# Altium footprint library Switch-TactileButton.PcbLib: 78 footprints (part 3 of 5)
Each footprint in its own frame and in the unit in brackets; x right, y up, seen from the top. Pads: shape width x height; smd on the part's side, far side on the other; paste and mask are expansions set on the pad; w line width, h text height; cw(c..) or ccw(c..) is an arc to the next point about the centre after c.
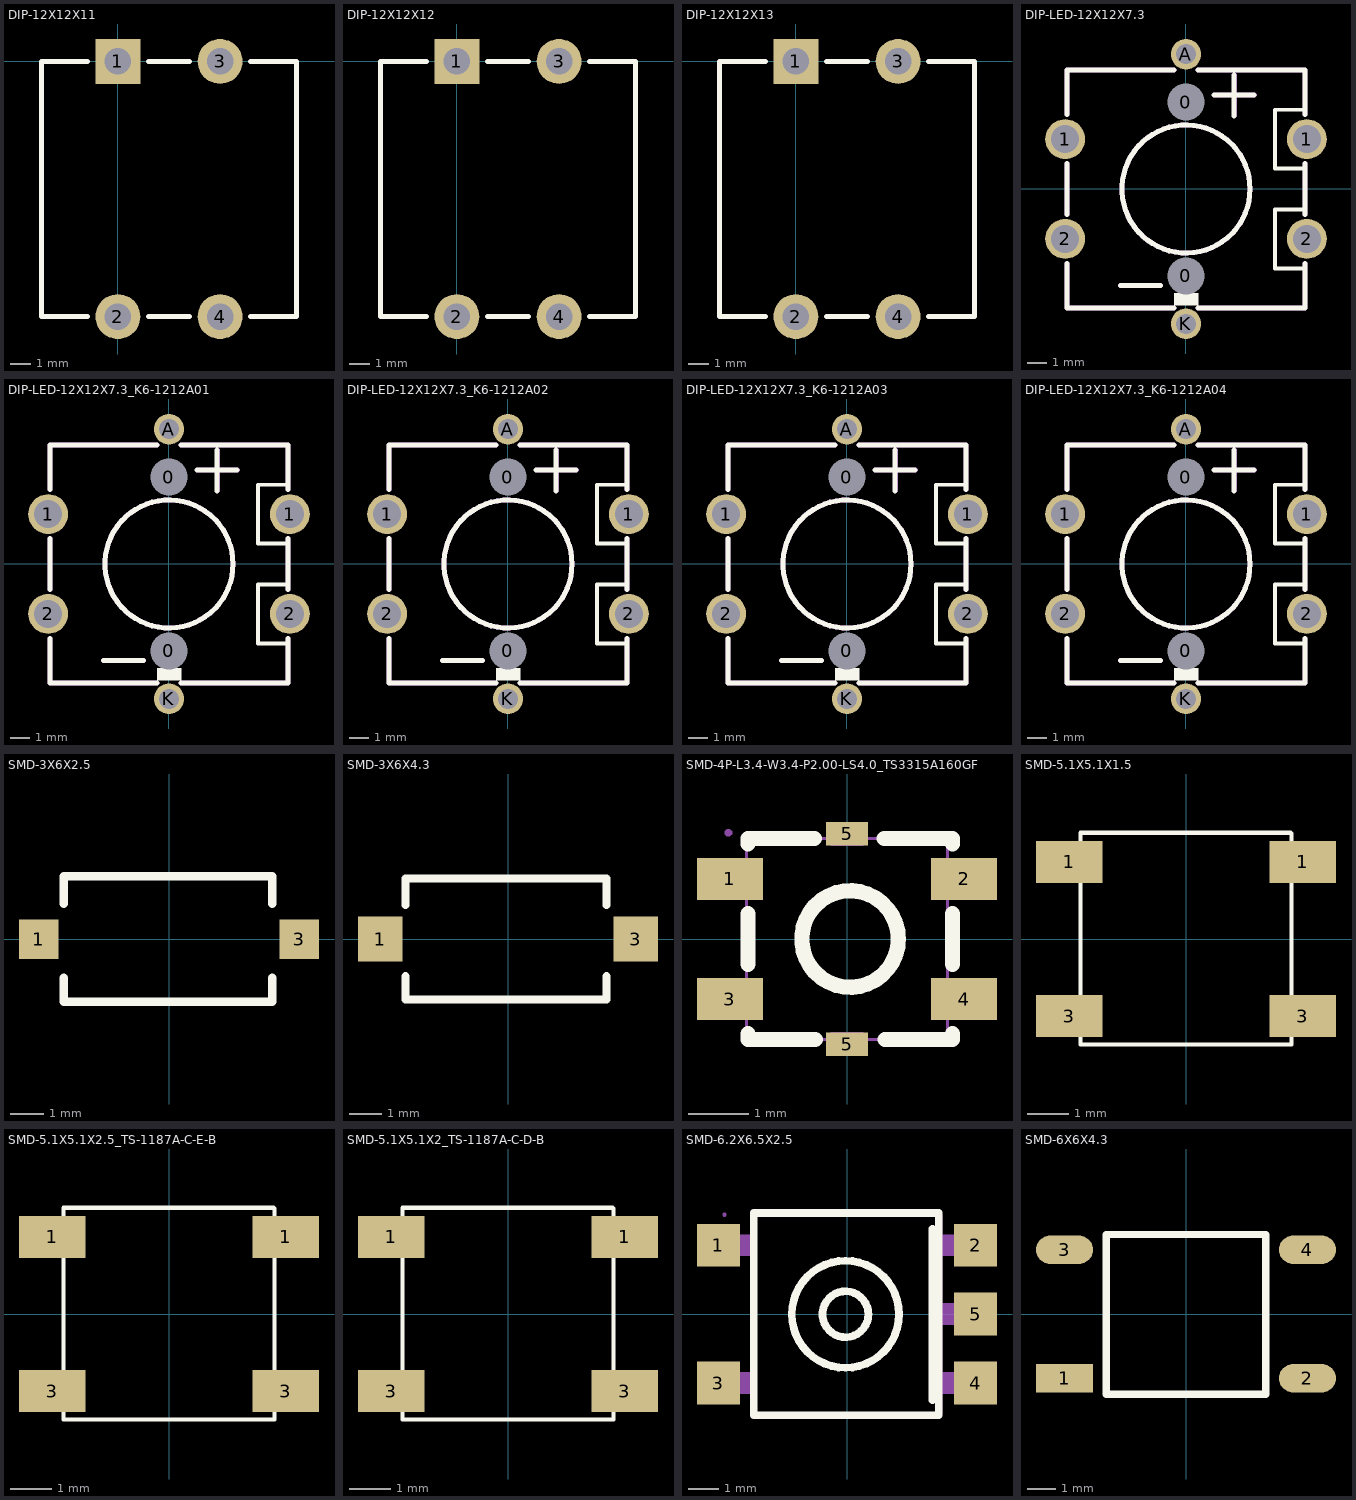
[diagram p2: the footprints below, top view; thin cyan lines are the x and y axes]

## DIP-12X12X11 [mm]
pads (4):
  rect 2.2x2.2 hole 1.3: 1(0,0)
  round 2.2 hole 1.3: 2(0,-12.5) 3(5,0) 4(5,-12.5)
Top Overlay:
  lines w0.254: -1.5,-12.5 -3.75,-12.5 -3.75,0 -1.5,0 ; 1.5,-12.5 3.5,-12.5 ; 1.5,0 3.5,0 ; 6.5,-12.5 8.75,-12.5 8.75,0 6.5,0
3D body "DIP-12X12X11.STEP": height 11.15, standoff -3.35, extent -3.46,-13.208 8.54,0.589

## DIP-12X12X12 [mm]
pads (4):
  rect 2.2x2.2 hole 1.3: 1(0,0)
  round 2.2 hole 1.3: 2(0,-12.5) 3(5,0) 4(5,-12.5)
Top Overlay:
  lines w0.254: -1.5,-12.5 -3.75,-12.5 -3.75,0 -1.5,0 ; 1.5,-12.5 3.5,-12.5 ; 1.5,0 3.5,0 ; 6.5,-12.5 8.75,-12.5 8.75,0 6.5,0
3D body "DIP-12X12X12.STEP": height 12.15, standoff -3.35, extent -3.46,-13.081 8.54,0.716

## DIP-12X12X13 [mm]
pads (4):
  rect 2.2x2.2 hole 1.3: 1(0,0)
  round 2.2 hole 1.3: 2(0,-12.5) 3(5,0) 4(5,-12.5)
Top Overlay:
  lines w0.254: -1.5,-12.5 -3.75,-12.5 -3.75,0 -1.5,0 ; 1.5,-12.5 3.5,-12.5 ; 1.5,0 3.5,0 ; 6.5,-12.5 8.75,-12.5 8.75,0 6.5,0
3D body "DIP-12X12X13.STEP": height 13.31, standoff -3.19, extent -3.46,-13.208 8.54,0.589

## DIP-LED-12X12X7.3 [mm] "韩国韩荣  K6-1212A01"
pads (8):
  round 1.524 hole 1.85 unplated: 0(0,-4.35) 0(0,4.35)
  round 2 hole 1.4: 1(-6.05,2.5) 1(6.05,2.5) 2(-6.05,-2.5) 2(6.05,-2.5)
  round 1.524 hole 1: A(0,6.75) K(0,-6.75)
Top Overlay:
  circle w0.254: c0,0 r3.205
  rectangle: -0.612,-5.842 0.635,-5.207
  lines w0.2: 5.969,-3.984 4.445,-3.984 4.445,-1.031 5.969,-1.031 ; 5.969,1.016 4.445,1.016 4.445,3.969 5.969,3.969
  lines w0.254: -5.969,-3.728 -5.969,-5.969 -0.612,-5.969 ; -5.969,-1.272 -5.969,1.272 ; -5.969,3.728 -5.969,5.969 -0.612,5.969 ; -3.286,-4.826 -1.286,-4.826 ; 0.612,-5.969 5.969,-5.969 5.969,-3.728 ; 0.612,5.969 5.969,5.969 5.969,3.728 ; 1.413,4.699 3.413,4.699 ; 2.413,3.668 2.413,5.699 ; 5.969,-1.272 5.969,1.272
Top Value:
  text "'.Comment'" at -4.346,-0.578 h2
Top Designator:
  text "'.Designator'" at -5.626,-0.416 h2
Top Assembly (Mech20):
  circle w0.254: c0,0 r3.205
  lines w0.254: -5.969,-3.728 -5.969,-5.969 -0.612,-5.969 ; -5.969,-1.271 -5.969,1.272 ; -5.969,3.729 -5.969,5.969 -0.612,5.969 ; -3.286,-4.826 -1.286,-4.826 ; 0.612,-5.969 5.969,-5.969 5.969,-3.728 ; 0.612,5.969 5.969,5.969 5.969,3.729 ; 1.424,4.714 3.424,4.714 ; 2.424,3.683 2.424,5.714 ; 5.969,-1.271 5.969,1.272
3D body "K6-1212A01.step": height 7.35, standoff -3.25, extent -6.74,-7 6.74,7

## DIP-LED-12X12X7.3_K6-1212A01 [mm] "韩国韩荣  K6-1212A01"
pads (8):
  round 1.524 hole 1.85 unplated: 0(0,-4.35) 0(0,4.35)
  round 2 hole 1.4: 1(-6.05,2.5) 1(6.05,2.5) 2(-6.05,-2.5) 2(6.05,-2.5)
  round 1.524 hole 1: A(0,6.75) K(0,-6.75)
Top Overlay:
  circle w0.254: c0,0 r3.205
  rectangle: -0.612,-5.842 0.635,-5.207
  lines w0.2: 5.969,-3.984 4.445,-3.984 4.445,-1.031 5.969,-1.031 ; 5.969,1.016 4.445,1.016 4.445,3.969 5.969,3.969
  lines w0.254: -5.969,-3.728 -5.969,-5.969 -0.612,-5.969 ; -5.969,-1.272 -5.969,1.272 ; -5.969,3.728 -5.969,5.969 -0.612,5.969 ; -3.286,-4.826 -1.286,-4.826 ; 0.612,-5.969 5.969,-5.969 5.969,-3.728 ; 0.612,5.969 5.969,5.969 5.969,3.728 ; 1.413,4.699 3.413,4.699 ; 2.413,3.668 2.413,5.699 ; 5.969,-1.272 5.969,1.272
Top Value:
  text "'.Comment'" at -4.346,-0.578 h2
Top Designator:
  text "'.Designator'" at -5.626,-0.416 h2
Top Assembly (Mech20):
  circle w0.254: c0,0 r3.205
  lines w0.254: -5.969,-3.728 -5.969,-5.969 -0.612,-5.969 ; -5.969,-1.271 -5.969,1.272 ; -5.969,3.729 -5.969,5.969 -0.612,5.969 ; -3.286,-4.826 -1.286,-4.826 ; 0.612,-5.969 5.969,-5.969 5.969,-3.728 ; 0.612,5.969 5.969,5.969 5.969,3.729 ; 1.424,4.714 3.424,4.714 ; 2.424,3.683 2.424,5.714 ; 5.969,-1.271 5.969,1.272
3D body "K6-1212A01.step": height 7.35, standoff -3.25, extent -6.74,-7 6.74,7

## DIP-LED-12X12X7.3_K6-1212A02 [mm] "韩国韩荣  K6-1212A02"
pads (8):
  round 1.524 hole 1.85 unplated: 0(0,-4.35) 0(0,4.35)
  round 2 hole 1.4: 1(-6.05,2.5) 1(6.05,2.5) 2(-6.05,-2.5) 2(6.05,-2.5)
  round 1.524 hole 1: A(0,6.75) K(0,-6.75)
Top Overlay:
  circle w0.254: c0,0 r3.205
  rectangle: -0.612,-5.842 0.635,-5.207
  lines w0.2: 5.969,-3.984 4.445,-3.984 4.445,-1.031 5.969,-1.031 ; 5.969,1.016 4.445,1.016 4.445,3.969 5.969,3.969
  lines w0.254: -5.969,-3.728 -5.969,-5.969 -0.612,-5.969 ; -5.969,-1.272 -5.969,1.272 ; -5.969,3.728 -5.969,5.969 -0.612,5.969 ; -3.286,-4.826 -1.286,-4.826 ; 0.612,-5.969 5.969,-5.969 5.969,-3.728 ; 0.612,5.969 5.969,5.969 5.969,3.728 ; 1.413,4.699 3.413,4.699 ; 2.413,3.668 2.413,5.699 ; 5.969,-1.272 5.969,1.272
Top Value:
  text "'.Comment'" at -4.346,-0.578 h2
Top Designator:
  text "'.Designator'" at -5.626,-0.416 h2
Top Assembly (Mech20):
  circle w0.254: c0,0 r3.205
  lines w0.254: -5.969,-3.728 -5.969,-5.969 -0.612,-5.969 ; -5.969,-1.271 -5.969,1.272 ; -5.969,3.729 -5.969,5.969 -0.612,5.969 ; -3.286,-4.826 -1.286,-4.826 ; 0.612,-5.969 5.969,-5.969 5.969,-3.728 ; 0.612,5.969 5.969,5.969 5.969,3.729 ; 1.424,4.714 3.424,4.714 ; 2.424,3.683 2.424,5.714 ; 5.969,-1.271 5.969,1.272
3D body "K6-1212A02.step": height 7.35, standoff -3.25, extent -6.74,-7 6.74,7

## DIP-LED-12X12X7.3_K6-1212A03 [mm] "韩国韩荣  K6-1212A03"
pads (8):
  round 1.524 hole 1.85 unplated: 0(0,-4.35) 0(0,4.35)
  round 2 hole 1.4: 1(-6.05,2.5) 1(6.05,2.5) 2(-6.05,-2.5) 2(6.05,-2.5)
  round 1.524 hole 1: A(0,6.75) K(0,-6.75)
Top Overlay:
  circle w0.254: c0,0 r3.205
  rectangle: -0.612,-5.842 0.635,-5.207
  lines w0.2: 5.969,-3.984 4.445,-3.984 4.445,-1.031 5.969,-1.031 ; 5.969,1.016 4.445,1.016 4.445,3.969 5.969,3.969
  lines w0.254: -5.969,-3.728 -5.969,-5.969 -0.612,-5.969 ; -5.969,-1.272 -5.969,1.272 ; -5.969,3.728 -5.969,5.969 -0.612,5.969 ; -3.286,-4.826 -1.286,-4.826 ; 0.612,-5.969 5.969,-5.969 5.969,-3.728 ; 0.612,5.969 5.969,5.969 5.969,3.728 ; 1.413,4.699 3.413,4.699 ; 2.413,3.668 2.413,5.699 ; 5.969,-1.272 5.969,1.272
Top Value:
  text "'.Comment'" at -4.346,-0.578 h2
Top Designator:
  text "'.Designator'" at -5.626,-0.416 h2
Top Assembly (Mech20):
  circle w0.254: c0,0 r3.205
  lines w0.254: -5.969,-3.728 -5.969,-5.969 -0.612,-5.969 ; -5.969,-1.271 -5.969,1.272 ; -5.969,3.729 -5.969,5.969 -0.612,5.969 ; -3.286,-4.826 -1.286,-4.826 ; 0.612,-5.969 5.969,-5.969 5.969,-3.728 ; 0.612,5.969 5.969,5.969 5.969,3.729 ; 1.424,4.714 3.424,4.714 ; 2.424,3.683 2.424,5.714 ; 5.969,-1.271 5.969,1.272
3D body "K6-1212A03.step": height 7.35, standoff -3.25, extent -6.74,-7 6.74,7

## DIP-LED-12X12X7.3_K6-1212A04 [mm] "韩国韩荣  K6-1212A04"
pads (8):
  round 1.524 hole 1.85 unplated: 0(0,-4.35) 0(0,4.35)
  round 2 hole 1.4: 1(-6.05,2.5) 1(6.05,2.5) 2(-6.05,-2.5) 2(6.05,-2.5)
  round 1.524 hole 1: A(0,6.75) K(0,-6.75)
Top Overlay:
  circle w0.254: c0,0 r3.205
  rectangle: -0.612,-5.842 0.635,-5.207
  lines w0.2: 5.969,-3.984 4.445,-3.984 4.445,-1.031 5.969,-1.031 ; 5.969,1.016 4.445,1.016 4.445,3.969 5.969,3.969
  lines w0.254: -5.969,-3.728 -5.969,-5.969 -0.612,-5.969 ; -5.969,-1.272 -5.969,1.272 ; -5.969,3.728 -5.969,5.969 -0.612,5.969 ; -3.286,-4.826 -1.286,-4.826 ; 0.612,-5.969 5.969,-5.969 5.969,-3.728 ; 0.612,5.969 5.969,5.969 5.969,3.728 ; 1.413,4.699 3.413,4.699 ; 2.413,3.668 2.413,5.699 ; 5.969,-1.272 5.969,1.272
Top Value:
  text "'.Comment'" at -4.346,-0.578 h2
Top Designator:
  text "'.Designator'" at -5.626,-0.416 h2
Top Assembly (Mech20):
  circle w0.254: c0,0 r3.205
  lines w0.254: -5.969,-3.728 -5.969,-5.969 -0.612,-5.969 ; -5.969,-1.271 -5.969,1.272 ; -5.969,3.729 -5.969,5.969 -0.612,5.969 ; -3.286,-4.826 -1.286,-4.826 ; 0.612,-5.969 5.969,-5.969 5.969,-3.728 ; 0.612,5.969 5.969,5.969 5.969,3.729 ; 1.424,4.714 3.424,4.714 ; 2.424,3.683 2.424,5.714 ; 5.969,-1.271 5.969,1.272
3D body "K6-1212A04.step": height 7.35, standoff -3.25, extent -6.74,-7 6.74,7

## SMD-3X6X2.5 [mm] "HCTL(华灿天禄)- TC-3601L-2.5-260G- C2845294"
pads (2):
  rect 1.2x1.2 smd: 1(-3.937,0) 3(3.937,0)
Top Overlay:
  lines w0.254: -3.182,-1.158 -3.182,-1.89 3.118,-1.89 3.118,-1.158 ; -3.182,1.077 -3.182,1.91 3.118,1.91 3.118,1.077
Top Value:
  text "'.Comment'" at -4.622,-0.571 h2
Top Designator:
  text "'.Designator'" at -5.901,-0.409 h2
3D body "SMD-3X6X2.5.STEP": height 2.59, standoff -0.03, extent -4,-1.778 4,1.722

## SMD-3X6X4.3 [mm] "HCTL(华灿天禄) - TC-3602-4.3-260G - C3012022"
pads (2):
  rect 1.4x1.4 smd: 1(-4,0) 3(4,0)
Top Overlay:
  lines w0.254: -3.212,-1.168 -3.212,-1.9 3.088,-1.9 3.088,-1.168 ; -3.212,1.067 -3.212,1.9 3.088,1.9 3.088,1.067
Top Value:
  text "'.Comment'" at -4.778,-0.581 h2
Top Designator:
  text "'.Designator'" at -6.058,-0.419 h2
3D body "SMD-3X6X4.3.STEP": height 4.4, standoff -0.03, extent -4.6,-1.778 4.6,1.722

## SMD-4P-L3.4-W3.4-P2.00-LS4.0_TS3315A160GF [mm]
pads (6):
  rect 1.1x0.701 smd mask+0.051: 1(-1.951,1.001) 2(1.951,1.001) 3(-1.951,-1.001) 4(1.951,-1.001)
  rect 0.701x0.399 smd mask+0.051: 5(0,-1.755) 5(0,1.755)
Top Overlay:
  circle w0.254: c0.051,0 r0.805
  lines w0.254: -1.651,-1.58 -1.651,-1.674 -0.531,-1.674 ; -1.651,-0.419 -1.651,0.419 ; -1.651,1.582 -1.651,1.674 -0.541,1.674 ; 0.622,1.674 1.75,1.674 ; 0.632,-1.674 1.76,-1.674 1.76,-1.58 ; 1.76,-0.419 1.76,0.419 ; 1.76,1.582 1.76,1.674
Top Component Outline:
  region: -1.915,1.77 -1.915,1.796 -1.951,1.831 -2.001,1.831 -2.037,1.796 -2.037,1.77 -2.037,1.745 -2.001,1.709 -1.951,1.709 -1.915,1.745 -1.915,1.77
  region: 1.626,-1.176 1.626,-0.826 1.976,-0.826 1.976,-1.176
  region: -1.976,-1.176 -1.976,-0.826 -1.626,-0.826 -1.626,-1.176
  region: 1.626,0.826 1.626,1.176 1.976,1.176 1.976,0.826
  region: -1.976,0.826 -1.976,1.176 -1.626,1.176 -1.626,0.826
  region: -0.269,1.554 -0.269,1.674 0.269,1.674 0.269,1.554
  region: 0.269,-1.554 0.269,-1.674 -0.269,-1.674 -0.269,-1.554
  lines w0.051: -1.674,-1.674 -1.674,1.674 1.674,1.674 1.674,-1.674 -1.674,-1.674
Top Value:
  text "'.Comment'" at -3.323,-0.436 h1.5
Top Designator:
  text "'.Designator'" at -4.252,-0.315 h1.5
Top Assembly (Mech20):
  region: -1.915,1.77 -1.915,1.796 -1.951,1.831 -2.001,1.831 -2.037,1.796 -2.037,1.77 -2.037,1.745 -2.001,1.709 -1.951,1.709 -1.915,1.745 -1.915,1.77
  region: 1.626,-1.176 1.626,-0.826 1.976,-0.826 1.976,-1.176
  region: -1.976,-1.176 -1.976,-0.826 -1.626,-0.826 -1.626,-1.176
  region: 1.626,0.826 1.626,1.176 1.976,1.176 1.976,0.826
  region: -1.976,0.826 -1.976,1.176 -1.626,1.176 -1.626,0.826
  region: -0.269,1.554 -0.269,1.674 0.269,1.674 0.269,1.554
  region: 0.269,-1.554 0.269,-1.674 -0.269,-1.674 -0.269,-1.554
  lines w0.051: -1.674,-1.674 -1.674,1.674 1.674,1.674 1.674,-1.674 -1.674,-1.674
3D body "TS3315A 160gf.step": height 1.5, standoff 0, extent -1.975,-1.675 1.975,1.675

## SMD-5.1X5.1X1.5 [mm]
pads (4):
  rect 1.6x1 smd: 1(-2.8,1.85) 1(2.8,1.85) 3(-2.8,-1.85) 3(2.8,-1.85)
Top Overlay:
  lines w0.1: 2.51,2.55 -1.27,2.55 -2.53,2.55 -2.53,-2.53 2.53,-2.53 2.53,2.53
Top Value:
  text "'.Comment'" at -4.397,-0.581 h2
Top Designator:
  text "'.Designator'" at -5.677,-0.419 h2
Bottom Courtyard:
  lines w0.1: -3.2,-2.1 -3.2,-1.6 -2.221,-1.6 ; 2.221,1.6 3.2,1.6 3.2,2.1
3D body "SMD-4X4X1.5.STEP": height 1.48, standoff -0.02, extent -3.327,-2.657 3.073,2.543

## SMD-5.1X5.1X2.5_TS-1187A-C-E-B [mm] "XKB Connection(中国星坤)  TS-1187A-C-E-B"
pads (4):
  rect 1.6x1 smd: 1(-2.8,1.85) 1(2.8,1.85) 3(-2.8,-1.85) 3(2.8,-1.85)
Top Overlay:
  lines w0.1: 2.51,2.55 -1.27,2.55 -2.53,2.55 -2.53,-2.53 2.53,-2.53 2.53,2.53
Top Value:
  text "'.Comment'" at -4.397,-0.581 h2
Top Designator:
  text "'.Designator'" at -5.677,-0.419 h2
Bottom Courtyard:
  lines w0.1: -3.2,-2.1 -3.2,-1.6 -2.221,-1.6 ; 2.221,1.6 3.2,1.6 3.2,2.1
3D body "TS-1187A-C-E-B.step": height 2.5, standoff -0.05, extent -3.25,-2.6 3.25,2.601

## SMD-5.1X5.1X2_TS-1187A-C-D-B [mm] "XKB Connection(中国星坤)  TS-1187A-C-D-B"
pads (4):
  rect 1.6x1 smd: 1(-2.8,1.85) 1(2.8,1.85) 3(-2.8,-1.85) 3(2.8,-1.85)
Top Overlay:
  lines w0.1: 2.51,2.55 -1.27,2.55 -2.53,2.55 -2.53,-2.53 2.53,-2.53 2.53,2.53
Top Value:
  text "'.Comment'" at -4.397,-0.581 h2
Top Designator:
  text "'.Designator'" at -5.677,-0.419 h2
Bottom Courtyard:
  lines w0.1: -3.2,-2.1 -3.2,-1.6 -2.221,-1.6 ; 2.221,1.6 3.2,1.6 3.2,2.1
3D body "TS-1187A-C-D-B_5.1X5.1X2.step": height 1.5, standoff 0, extent -3.2,-2.6 3.2,2.6

## SMD-6.2X6.5X2.5 [mm] "KEY-SMD_4P-L6.2-W6.5-P4.50-LS8.0_SKHMXX"
pads (5):
  rect 1.4x1.4 smd mask+0.051: 1(-4.2,2.25) 2(4.2,2.25) 3(-4.2,-2.25) 4(4.2,-2.25) 5(4.2,0)
Top Overlay:
  circle w0.254: c-0.051,-0.003 r1.75
  circle w0.254: c-0.051,-0.003 r0.749
  lines w0.254: -3.048,3.3 -3.048,-3.3 3,-3.3 3,3.3 -3,3.3 ; 2.794,-2.805 2.794,2.783
Top Component Outline:
  region: -4,-2.6 -4,-1.9 -3.5,-1.9 -3.5,-2.6
  region: -3.51,-2.6 -3.51,-1.9 -3.09,-1.9 -3.09,-2.6
  region: 3.5,-2.6 3.5,-1.9 4,-1.9 4,-2.6
  region: 3.09,-2.6 3.09,-1.9 3.51,-1.9 3.51,-2.6
  region: 3.5,1.9 3.5,2.6 4,2.6 4,1.9
  region: 3.09,1.9 3.09,2.6 3.51,2.6 3.51,1.9
  region: -4,1.9 -4,2.6 -3.5,2.6 -3.5,1.9
  region: -3.51,1.9 -3.51,2.6 -3.09,2.6 -3.09,1.9
  region: 3.5,-0.35 3.5,0.35 4,0.35 4,-0.35
  region: 3.09,-0.35 3.09,0.35 3.51,0.35 3.51,-0.35
  region: -3.94,3.25 -3.94,3.275 -3.975,3.31 -4.025,3.31 -4.06,3.275 -4.06,3.25 -4.06,3.225 -4.025,3.19 -3.975,3.19 -3.94,3.225 -3.94,3.25
  lines w0.051: -3.1,-3.25 -3.1,3.25 3.1,3.25 3.1,-3.25 -3.1,-3.25
Top Component Center:
  circle w0.2: c4.572,0 r0.1
Top Value:
  text "'.Comment'" at -4.397,-0.581 h2
Top Designator:
  text "'.Designator'" at -5.677,-0.419 h2

## SMD-6X6X4.3 [mm]
pads (4):
  rect 2x1 smd: 1(-4.25,-2.25)
  oval 2x1 smd: 2(4.25,-2.25) 3(-4.25,2.25) 4(4.25,2.25)
Top Overlay:
  lines w0.254: -2.794,-2.805 2.794,-2.805 2.794,2.783 -2.794,2.783 -2.794,-2.805
Top Value:
  text "'.Comment'" at -4.397,-0.581 h2
Top Designator:
  text "'.Designator'" at -5.677,-0.419 h2
3D body "SMD-6X6X4.3.STEP": height 4.25, standoff 0.05, extent -4.526,-3.004 4.474,2.996